# Altium schematic symbol library TestPoints.SchLib: 1 symbol
Pins are listed as number, name and electrical type; pins without a type are passive.

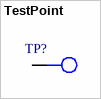
[diagram p0: symbol TestPoint]

## TestPoint
designator TP?  (value not drawn)
footprint TestPoint_1.5mm (1.5mm smd round testpoint)
pins: 1